# Altium integrated library CUI_PJ102AH.IntLib: 1 symbol
Pins are listed as number, name and electrical type; pins without a type are passive.

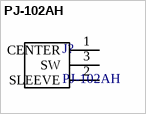
[diagram p0: symbol PJ-102AH]

## PJ-102AH
designator J?
DC power jack, 2.0 mm centre pin, 5.5 mm plug, 5 A 24 V, right angle THT, switched; Manufacturer: Same Sky (formerly CUI Devices); Center Pin: 2.0mm (mates 5.5 x 2.1 mm plugs); Rated: 24VDC 5A; Pin 1: centre pin = + for a centre-positive adapter; Pin 3: switch: closed to pin 2 with no plug, open with a plug in; Component Type: DC power jack; Height Above Board: 11.0mm; Manufacturer Part Number: PJ-102AH; Supplier: Digi-Key; Supplier Part Number: CP-102AH-ND; LCSC Part #: C3096093
footprint CUI_PJ-102AH_DC_JACK_RA (CUI PJ-102AH datasheet 10/30/2019 PCB layout, round 1.6 holes)
pins: 1 CENTER, 2 SLEEVE, 3 SW